# Altium schematic symbol library MAX22190ATJ&plus_.SchLib: 1 symbol
Pins are listed as number, name and electrical type; pins without a type are passive.

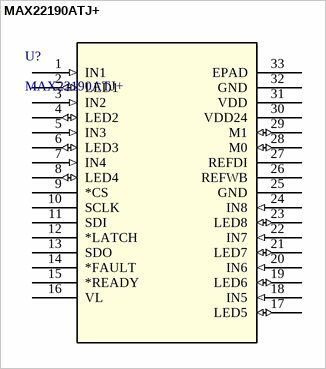
[diagram p0: symbol MAX22190ATJ+]

## MAX22190ATJ+
designator U?
Octal Industrial Digital Input with Diagnostics; Manufacturer_Name: Analog Devices Inc; Copyright: Copyright (C) 2026 Ultra Librarian. All rights reserved.; Manufacturer_Part_Number: MAX22190ATJ+; RefDes: RefDes; Type: Type
footprint 21-0140L_T3255-5_MXM
pins: 1 IN1 (in), 2 LED1 (io), 3 IN2 (in), 4 LED2 (io), 5 IN3 (in), 6 LED3 (io), 7 IN4 (in), 8 LED4 (io), 9 *CS, 10 SCLK, 11 SDI, 12 *LATCH, 13 SDO, 14 *FAULT, 15 *READY, 16 VL, 17 LED5 (io), 18 IN5 (in), 19 LED6 (io), 20 IN6 (in), 21 LED7 (io), 22 IN7 (in), 23 LED8 (io), 24 IN8 (in), 25 GND (power), 26 REFWB, 27 REFDI, 28 M0 (io), 29 M1 (io), 30 VDD24 (power), 31 VDD (power), 32 GND (power), 33 EPAD